# Altium schematic symbol library Symboles.SchLib: 6 symbols
Pins are listed as number, name and electrical type; pins without a type are passive.

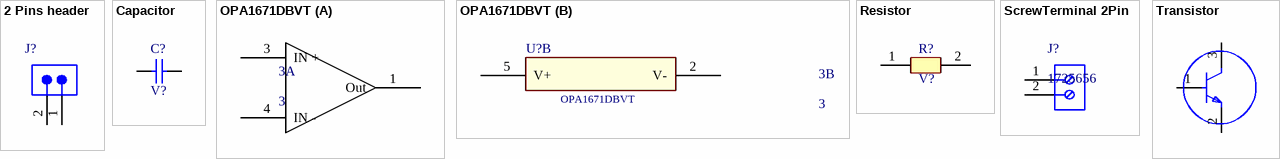
[diagram p0: symbols 2 Pins header to Transistor]

## 2 Pins header
designator J?
2Pin Header; PartNumber: TSW-102-26-F-S; Manufacturer: Samtec; Pitch: 2.54 mm; PackageVersion: DM, 8/1988; ComponentLink2Description: Datasheet; PackageReference: TSW-102-26-XX-S; ComponentLink3URL: http://www.samtec.com/documents/webfiles/cpdf/TSW-XXX-XX-XXX-X-XX-XXX-MKT.pdf; ComponentLink2URL: http://www.samtec.com/documents/webfiles/pdf/TSW_TH.PDF; ComponentLink1Description: Manufacturer URL; DatasheetVersion: F-214; RoHS: True; ComponentLink3Description: Package Specification; Temperature Range: -55 to 125 degC; Orientation: Vertical; ComponentLink1URL: http://www.samtec.com; PackageDescription: .025[0.64] SQ. Post Terminal Strip Assembly; Mounting Technology: Through-hole
footprint HEADER_2PIN_2_54 (.025 SQ Post Terminal Strip Assembly, 1x2 Pins, Vertical, 2.54mm Pitch, Male)
pins: 1, 2

## Capacitor
designator C?, comment V?
Capacitor; Rated Voltage: 100 V; Value: 100nF; Case-Metric: 3216; Case-EIA: 1206; Tolerance: Â±5%; Technology: SMT; Max Thickness: 1.7 mm
footprint CAPACITOR_1206 (Chip Capacitor, Body 3.2x1.6mm, Height 1.7mm, IPC Low Density)
pins: 1, 2
1 alternate drawing of the same symbol

## OPA1671DBVT
designator 3, comment 3
AOP
footprint AOP-1671IDBVR
part A pins: 1 Out, 3 IN +, 4 IN -
part B pins: 2 V-, 5 V+
part B text: U?B

## Resistor
designator R?, comment V?
Résistance
footprint RESISTOR_1206
footprint RESISTOR_0806
pins: 1, 2

## ScrewTerminal 2Pin
designator J?, comment 1725656
2Pin Header Screw; Manufacturer: Phoenix Contact; Number of contacts: 2; Content: 250pc(s); Pitch: 2.54mm; Industrial packaging: Yes; Colour: Green; Manufacturer part No.: 1725656; Type: MPT0,5/2-2,54; Datasheet URL: http://datasheet.octopart.com/1725656-Phoenix-Contact-datasheet-5302866.pdf; Manufacturer URL: http://www.phoenixcontact.com/; Datasheet Version: Apr-08
footprint 2_Pin_Terminal
pins: 1, 2

## Transistor
designator Q?
Transistor; RoHS Compliant: Yes
footprint TRANSISTOR_BC847
pins: 1 B, 2 E, 3 C